# Altium schematic symbol library SamacSys.SchLib: 3 symbols
Pins are listed as number, name and electrical type; pins without a type are passive.

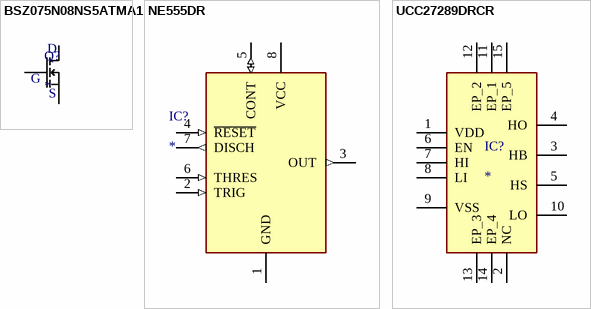
[diagram p0: symbols BSZ075N08NS5ATMA1 to UCC27289DRCR]

## BSZ075N08NS5ATMA1
designator Q?
MOSFET (N-Channel); Manufacturer_Name: Infineon; Manufacturer_Part_Number: BSZ075N08NS5ATMA1; Datasheet Link: https://www.infineon.com/dgdl/Infineon-BSZ075N08NS5-DataSheet-v02_03-EN.pdf?fileId=5546d461454603990145ccd5743e61f8; Height: 1mm; Mouser Part Number: 726-BSZ075N08NS5ATMA; Mouser Price/Stock: https://www.mouser.co.uk/ProductDetail/Infineon-Technologies/BSZ075N08NS5ATMA1?qs=3Bi3m9r5MQbCecwbz%252BCetA%3D%3D; Arrow Part Number: BSZ075N08NS5ATMA1; Arrow Price/Stock: https://www.arrow.com/en/products/bsz075n08ns5atma1/infineon-technologies-ag?utm_currency=USD&region=nac
footprint BSZ0909LSATMA1
pins: 1,2,3,10 S_1, 4 G, 5,6,7,8,9 D
text: S

## NE555DR
designator IC?
Integrated Circuit; Manufacturer_Name: Texas Instruments; Manufacturer_Part_Number: NE555DR; Datasheet Link: http://www.ti.com/lit/ds/symlink/ne555.pdf; Height: 1.75mm; Mouser Part Number: 595-NE555DR; Mouser Price/Stock: https://www.mouser.com/Search/Refine.aspx?Keyword=595-NE555DR; RS Part Number: 1218414; RS Price/Stock: http://uk.rs-online.com/web/p/products/1218414
footprint SOIC127P600X175-8N
pins: 1 GND (power), 2 TRIG (in), 3 OUT (out), 4 ~{RESET} (in), 5 CONT (io), 6 THRES (in), 7 DISCH (out), 8 VCC (power)

## UCC27289DRCR
designator IC?
Integrated Circuit; Manufacturer_Name: Texas Instruments; Manufacturer_Part_Number: UCC27289DRCR; Datasheet Link: https://www.ti.com/lit/ds/symlink/ucc27289.pdf?ts=1715220331720&ref_url=https%253A%252F%252Fwww.mouser.tw%252F; Height: 1mm; Mouser Part Number: 595-UCC27289DRCR; Mouser Price/Stock: https://www.mouser.co.uk/ProductDetail/Texas-Instruments/UCC27289DRCR?qs=rQFj71Wb1eUTx1xsT8GKBg%3D%3D
footprint TPS51200MDRCTEP
pins: 1 VDD, 2 NC, 3 HB, 4 HO, 5 HS, 6 EN, 7 HI, 8 LI, 9 VSS, 10 LO, 11 EP_1, 12 EP_2, 13 EP_3, 14 EP_4, 15 EP_5